# Altium footprint library WR-TBL_Pluggable Connector_5.08mm.PcbLib: 295 footprints (part 6 of 19)
Each footprint in its own frame and in the unit in brackets; x right, y up, seen from the top. Pads: shape width x height; smd on the part's side, far side on the other; paste and mask are expansions set on the pad; w line width, h text height; cw(c..) or ccw(c..) is an arc to the next point about the centre after c.
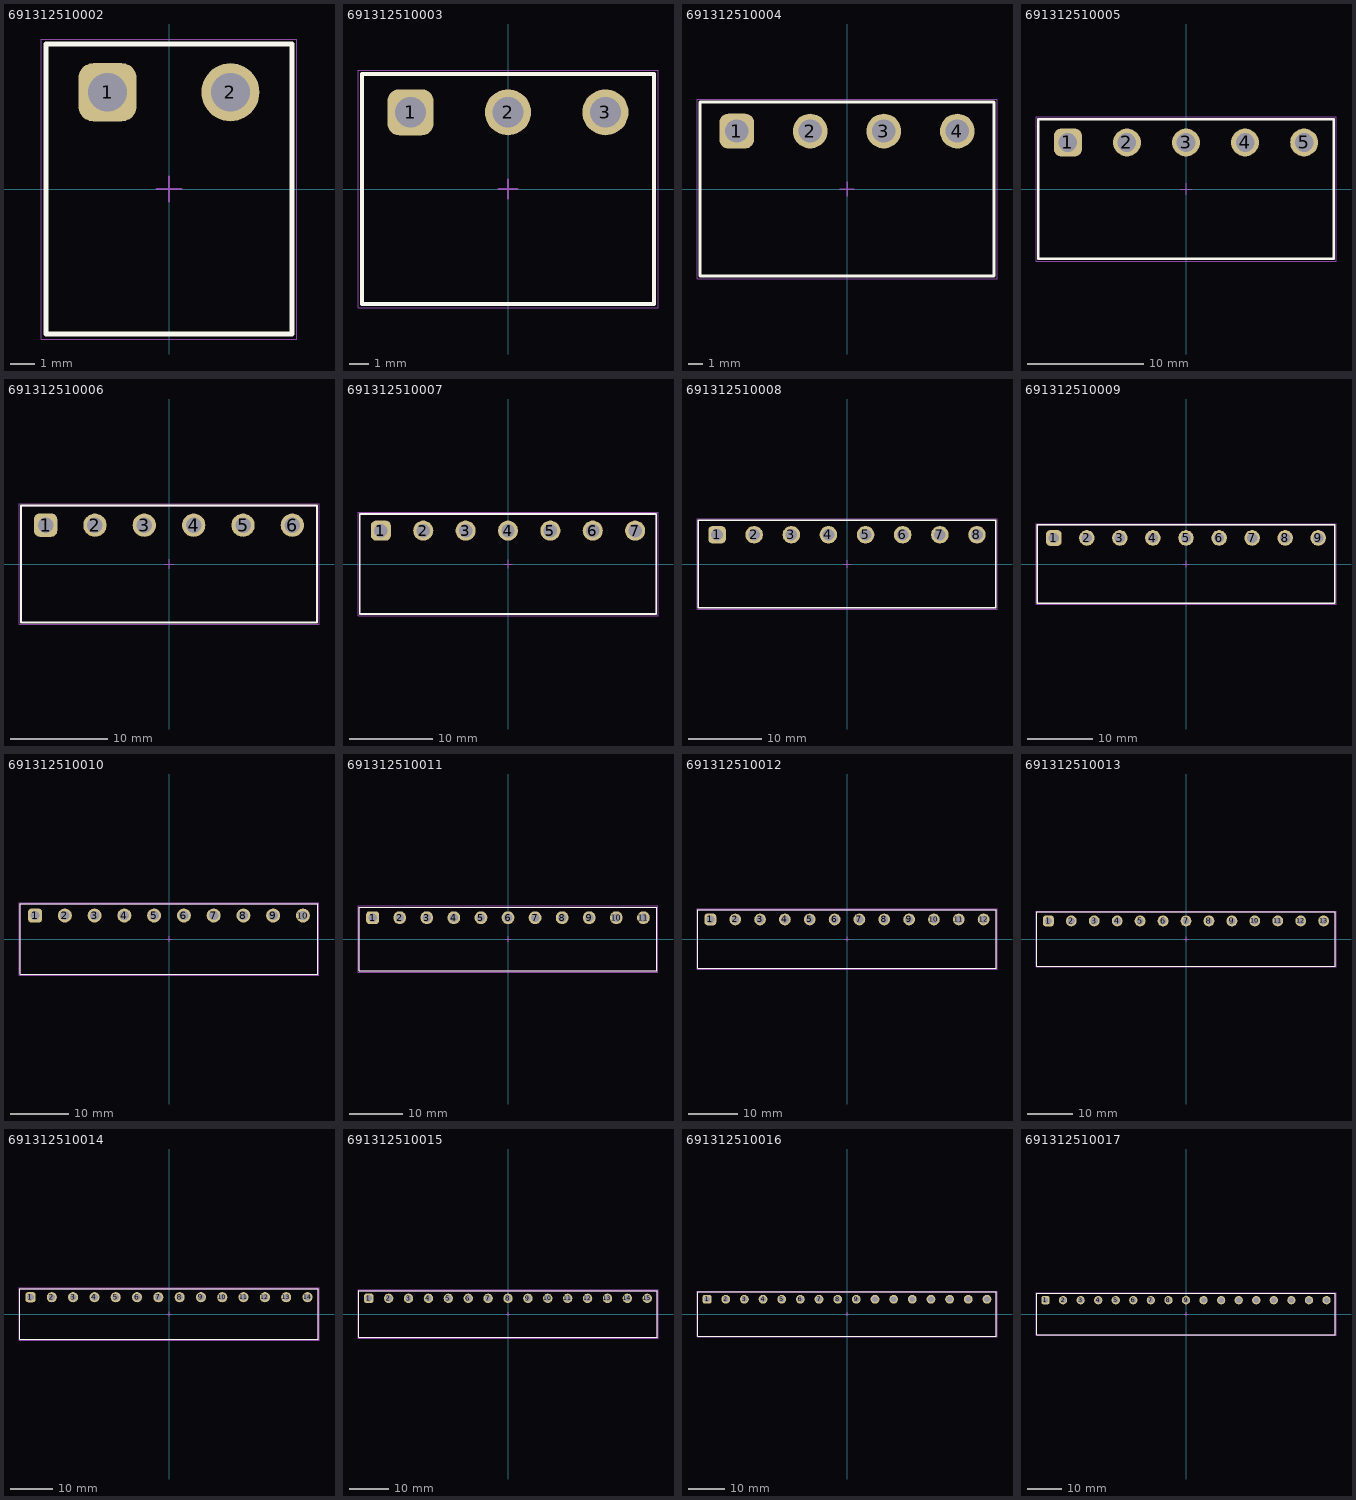
[diagram p5: the footprints below, top view; thin cyan lines are the x and y axes]

## 691312510002 [mm] "5,08mm - PCB Headers - Horizontal - Opened ends - 02p"
height 8.5
pads (2):
  rrect50% 2.4x2.4 hole 1.6: 1(-2.54,4)
  round 2.4 hole 1.6: 2(2.54,4)
Top Overlay:
  lines w0.2: -5.08,-6 5.08,-6 5.08,6 -5.08,6 -5.08,-6
Top Assembly:
  lines w0.1: -5.08,-6 -5.08,6 5.08,6 5.08,-6 -5.08,-6
Top Designator:
  text ".Designator" at -3.647,-0.357 h1
Top 3D Body:
  lines w0.1: -5.08,-6 5.08,-6 5.08,6 -5.08,6 -5.08,-6
Top Courtyard:
  lines w0.05: -5.28,-6.2 5.28,-6.2 5.28,6.2 -5.28,6.2 -5.28,-6.2
Top Component Center:
  lines w0.1: -0.5,0 0.5,0 ; 0,-0.5 0,0.5
3D body "691312510002.stp": height 8.55, standoff -3.45, extent -5.08,-6 5.08,6

## 691312510003 [mm] "5,08mm - PCB Headers - Horizontal - Opened ends - 03p"
height 8.5
pads (3):
  rrect50% 2.4x2.4 hole 1.6: 1(-5.08,4)
  round 2.4 hole 1.6: 2(0,4) 3(5.08,4)
Top Overlay:
  lines w0.2: -7.62,-6 -7.62,6 7.62,6 7.62,-6 -7.62,-6
Top Assembly:
  lines w0.1: -7.62,-6 7.62,-6 7.62,6 -7.62,6 -7.62,-6
Top Designator:
  text ".Designator" at -3.647,-0.357 h1
Top 3D Body:
  lines w0.1: -7.62,-6 -7.62,6 7.62,6 7.62,-6 -7.62,-6
Top Courtyard:
  lines w0.05: -7.82,-6.2 -7.82,6.2 7.82,6.2 7.82,-6.2 -7.82,-6.2
Top Component Center:
  lines w0.1: -0.5,0 0.5,0 ; 0,-0.5 0,0.5
3D body "691312510003.stp": height 8.55, standoff -3.45, extent -7.62,-6 7.62,6

## 691312510004 [mm] "5,08mm - PCB Headers - Horizontal - Opened ends - 04p"
height 8.5
pads (4):
  rrect50% 2.4x2.4 hole 1.6: 1(-7.62,4)
  round 2.4 hole 1.6: 2(-2.54,4) 3(2.54,4) 4(7.62,4)
Top Overlay:
  lines w0.2: -10.16,-6 -10.16,6 10.16,6 10.16,-6 -10.16,-6
Top Assembly:
  lines w0.1: -10.16,-6 10.16,-6 10.16,6 -10.16,6 -10.16,-6
Top Designator:
  text ".Designator" at -3.647,-0.357 h1
Top 3D Body:
  lines w0.1: -10.16,-6 -10.16,6 10.16,6 10.16,-6 -10.16,-6
Top Courtyard:
  lines w0.05: -10.36,-6.2 -10.36,6.2 10.36,6.2 10.36,-6.2 -10.36,-6.2
Top Component Center:
  lines w0.1: -0.5,0 0.5,0 ; 0,-0.5 0,0.5
3D body "691312510004.stp": height 8.55, standoff -3.45, extent -10.16,-6 10.16,6

## 691312510005 [mm] "5,08mm - PCB Headers - Horizontal - Opened ends - 05p"
height 8.5
pads (5):
  rrect50% 2.4x2.4 hole 1.6: 1(-10.16,4)
  round 2.4 hole 1.6: 2(-5.08,4) 3(0,4) 4(5.08,4) 5(10.16,4)
Top Overlay:
  lines w0.2: -12.7,-6 -12.7,6 12.7,6 12.7,-6 -12.7,-6
Top Assembly:
  lines w0.1: -12.7,-6 12.7,-6 12.7,6 -12.7,6 -12.7,-6
Top Designator:
  text ".Designator" at -3.647,-0.357 h1
Top 3D Body:
  lines w0.1: -12.7,-6 -12.7,6 12.7,6 12.7,-6 -12.7,-6
Top Courtyard:
  lines w0.05: -12.9,-6.2 -12.9,6.2 12.9,6.2 12.9,-6.2 -12.9,-6.2
Top Component Center:
  lines w0.1: -0.5,0 0.5,0 ; 0,-0.5 0,0.5
3D body "691312510005.stp": height 8.55, standoff -3.45, extent -12.7,-6 12.7,6

## 691312510006 [mm] "5,08mm - PCB Headers - Horizontal - Opened ends - 06p"
height 8.5
pads (6):
  rrect50% 2.4x2.4 hole 1.6: 1(-12.7,4)
  round 2.4 hole 1.6: 2(-7.62,4) 3(-2.54,4) 4(2.54,4) 5(7.62,4) 6(12.7,4)
Top Overlay:
  lines w0.2: -15.24,-6 15.24,-6 15.24,6 -15.24,6 -15.24,-6
Top Assembly:
  lines w0.1: -15.24,-6 -15.24,6 15.24,6 15.24,-6 -15.24,-6
Top Designator:
  text ".Designator" at -3.647,-0.357 h1
Top 3D Body:
  lines w0.1: -15.24,-6 15.24,-6 15.24,6 -15.24,6 -15.24,-6
Top Courtyard:
  lines w0.05: -15.44,-6.2 15.44,-6.2 15.44,6.2 -15.44,6.2 -15.44,-6.2
Top Component Center:
  lines w0.1: -0.5,0 0.5,0 ; 0,-0.5 0,0.5
3D body "691312510006.stp": height 8.55, standoff -3.45, extent -15.24,-6 15.24,6

## 691312510007 [mm] "5,08mm - PCB Headers - Horizontal - Opened ends - 07p"
height 8.5
pads (7):
  rrect50% 2.4x2.4 hole 1.6: 1(-15.24,4)
  round 2.4 hole 1.6: 2(-10.16,4) 3(-5.08,4) 4(0,4) 5(5.08,4) 6(10.16,4) 7(15.24,4)
Top Overlay:
  lines w0.2: -17.78,-6 17.78,-6 17.78,6 -17.78,6 -17.78,-6
Top Assembly:
  lines w0.1: -17.78,-6 -17.78,6 17.78,6 17.78,-6 -17.78,-6
Top Designator:
  text ".Designator" at -3.647,-0.357 h1
Top 3D Body:
  lines w0.1: -17.78,-6 17.78,-6 17.78,6 -17.78,6 -17.78,-6
Top Courtyard:
  lines w0.05: -17.98,-6.2 17.98,-6.2 17.98,6.2 -17.98,6.2 -17.98,-6.2
Top Component Center:
  lines w0.1: -0.5,0 0.5,0 ; 0,-0.5 0,0.5
3D body "691312510007.stp": height 8.55, standoff -3.45, extent -17.78,-6 17.78,6

## 691312510008 [mm] "5,08mm - PCB Headers - Horizontal - Opened ends - 08p"
height 8.5
pads (8):
  rrect50% 2.4x2.4 hole 1.6: 1(-17.78,4)
  round 2.4 hole 1.6: 2(-12.7,4) 3(-7.62,4) 4(-2.54,4) 5(2.54,4) 6(7.62,4) 7(12.7,4) 8(17.78,4)
Top Overlay:
  lines w0.2: -20.32,-6 -20.32,6 20.32,6 20.32,-6 -20.32,-6
Top Assembly:
  lines w0.1: -20.32,-6 20.32,-6 20.32,6 -20.32,6 -20.32,-6
Top Designator:
  text ".Designator" at -3.647,-0.357 h1
Top 3D Body:
  lines w0.1: -20.32,-6 -20.32,6 20.32,6 20.32,-6 -20.32,-6
Top Courtyard:
  lines w0.05: -20.52,-6.2 -20.52,6.2 20.52,6.2 20.52,-6.2 -20.52,-6.2
Top Component Center:
  lines w0.1: -0.5,0 0.5,0 ; 0,-0.5 0,0.5
3D body "691312510008.stp": height 8.55, standoff -3.45, extent -20.32,-6 20.32,6

## 691312510009 [mm] "5,08mm - PCB Headers - Horizontal - Opened ends - 09p"
height 8.5
pads (9):
  rrect50% 2.4x2.4 hole 1.6: 1(-20.32,4)
  round 2.4 hole 1.6: 2(-15.24,4) 3(-10.16,4) 4(-5.08,4) 5(0,4) 6(5.08,4) 7(10.16,4) 8(15.24,4) 9(20.32,4)
Top Overlay:
  lines w0.2: -22.86,-6 22.86,-6 22.86,6 -22.86,6 -22.86,-6
Top Assembly:
  lines w0.1: -22.86,-6 -22.86,6 22.86,6 22.86,-6 -22.86,-6
Top Designator:
  text ".Designator" at -3.647,-0.357 h1
Top 3D Body:
  lines w0.1: -22.86,-6 22.86,-6 22.86,6 -22.86,6 -22.86,-6
Top Courtyard:
  lines w0.05: -23.06,-6.2 23.06,-6.2 23.06,6.2 -23.06,6.2 -23.06,-6.2
Top Component Center:
  lines w0.1: -0.5,0 0.5,0 ; 0,-0.5 0,0.5
3D body "691312510009.stp": height 8.55, standoff -3.45, extent -22.86,-6 22.86,6

## 691312510010 [mm] "5,08mm - PCB Headers - Horizontal - Opened ends - 10p"
height 8.5
pads (10):
  rrect50% 2.4x2.4 hole 1.6: 1(-22.86,4)
  round 2.4 hole 1.6: 2(-17.78,4) 3(-12.7,4) 4(-7.62,4) 5(-2.54,4) 6(2.54,4) 7(7.62,4) 8(12.7,4) 9(17.78,4) 10(22.86,4)
Top Overlay:
  lines w0.2: -25.4,-6 -25.4,6 25.4,6 25.4,-6 -25.4,-6
Top Assembly:
  lines w0.1: -25.4,-6 25.4,-6 25.4,6 -25.4,6 -25.4,-6
Top Designator:
  text ".Designator" at -3.647,-0.357 h1
Top 3D Body:
  lines w0.1: -25.4,-6 -25.4,6 25.4,6 25.4,-6 -25.4,-6
Top Courtyard:
  lines w0.05: -25.6,-6.2 -25.6,6.2 25.6,6.2 25.6,-6.2 -25.6,-6.2
Top Component Center:
  lines w0.1: -0.5,0 0.5,0 ; 0,-0.5 0,0.5
3D body "691312510010.stp": height 8.55, standoff -3.45, extent -25.4,-6 25.4,6

## 691312510011 [mm] "5,08mm - PCB Headers - Horizontal - Opened ends - 11p"
height 8.5
pads (11):
  rrect50% 2.4x2.4 hole 1.6: 1(-25.4,4)
  round 2.4 hole 1.6: 2(-20.32,4) 3(-15.24,4) 4(-10.16,4) 5(-5.08,4) 6(0,4) 7(5.08,4) 8(10.16,4) 9(15.24,4) 10(20.32,4) 11(25.4,4)
Top Overlay:
  lines w0.2: -27.94,-6 27.94,-6 27.94,6 -27.94,6 -27.94,-6
Top Assembly:
  lines w0.1: -27.94,-6 -27.94,6 27.94,6 27.94,-6 -27.94,-6
Top Designator:
  text ".Designator" at -3.647,-0.357 h1
Top 3D Body:
  lines w0.1: -27.94,-6 27.94,-6 27.94,6 -27.94,6 -27.94,-6
Top Courtyard:
  lines w0.05: -28.14,-6.2 28.14,-6.2 28.14,6.2 -28.14,6.2 -28.14,-6.2
Top Component Center:
  lines w0.1: -0.5,0 0.5,0 ; 0,-0.5 0,0.5
3D body "691312510011.stp": height 8.55, standoff -3.45, extent -27.94,-6 27.94,6

## 691312510012 [mm] "5,08mm - PCB Headers - Horizontal - Opened ends - 12p"
height 8.5
pads (12):
  rrect50% 2.4x2.4 hole 1.6: 1(-27.94,4)
  round 2.4 hole 1.6: 2(-22.86,4) 3(-17.78,4) 4(-12.7,4) 5(-7.62,4) 6(-2.54,4) 7(2.54,4) 8(7.62,4) 9(12.7,4) 10(17.78,4) 11(22.86,4) 12(27.94,4)
Top Overlay:
  lines w0.2: -30.48,-6 30.48,-6 30.48,6 -30.48,6 -30.48,-6
Top Assembly:
  lines w0.1: -30.48,-6 -30.48,6 30.48,6 30.48,-6 -30.48,-6
Top Designator:
  text ".Designator" at -3.647,-0.357 h1
Top 3D Body:
  lines w0.1: -30.48,-6 30.48,-6 30.48,6 -30.48,6 -30.48,-6
Top Courtyard:
  lines w0.05: -30.68,-6.2 30.68,-6.2 30.68,6.2 -30.68,6.2 -30.68,-6.2
Top Component Center:
  lines w0.1: -0.5,0 0.5,0 ; 0,-0.5 0,0.5
3D body "691312510012.stp": height 8.55, standoff -3.45, extent -30.48,-6 30.48,6

## 691312510013 [mm] "5,08mm - PCB Headers - Horizontal - Opened ends - 13p"
height 8.5
pads (13):
  rrect50% 2.4x2.4 hole 1.6: 1(-30.48,4)
  round 2.4 hole 1.6: 2(-25.4,4) 3(-20.32,4) 4(-15.24,4) 5(-10.16,4) 6(-5.08,4) 7(0,4) 8(5.08,4) 9(10.16,4) 10(15.24,4) 11(20.32,4) 12(25.4,4) 13(30.48,4)
Top Overlay:
  lines w0.2: -33.02,-6 -33.02,6 33.02,6 33.02,-6 -33.02,-6
Top Assembly:
  lines w0.1: -33.02,-6 33.02,-6 33.02,6 -33.02,6 -33.02,-6
Top Designator:
  text ".Designator" at -3.647,-0.357 h1
Top 3D Body:
  lines w0.1: -33.02,-6 -33.02,6 33.02,6 33.02,-6 -33.02,-6
Top Courtyard:
  lines w0.05: -33.22,-6.2 -33.22,6.2 33.22,6.2 33.22,-6.2 -33.22,-6.2
Top Component Center:
  lines w0.1: -0.5,0 0.5,0 ; 0,-0.5 0,0.5
3D body "691312510013.stp": height 8.55, standoff -3.45, extent -33.02,-6 33.02,6

## 691312510014 [mm] "5,08mm - PCB Headers - Horizontal - Opened ends - 14p"
height 8.5
pads (14):
  rrect50% 2.4x2.4 hole 1.6: 1(-33.02,4)
  round 2.4 hole 1.6: 2(-27.94,4) 3(-22.86,4) 4(-17.78,4) 5(-12.7,4) 6(-7.62,4) 7(-2.54,4) 8(2.54,4) 9(7.62,4) 10(12.7,4) 11(17.78,4) 12(22.86,4) 13(27.94,4) 14(33.02,4)
Top Overlay:
  lines w0.2: -35.56,-6 35.56,-6 35.56,6 -35.56,6 -35.56,-6
Top Assembly:
  lines w0.1: -35.56,-6 -35.56,6 35.56,6 35.56,-6 -35.56,-6
Top Designator:
  text ".Designator" at -3.647,-0.357 h1
Top 3D Body:
  lines w0.1: -35.56,-6 35.56,-6 35.56,6 -35.56,6 -35.56,-6
Top Courtyard:
  lines w0.05: -35.76,-6.2 35.76,-6.2 35.76,6.2 -35.76,6.2 -35.76,-6.2
Top Component Center:
  lines w0.1: -0.5,0 0.5,0 ; 0,-0.5 0,0.5
3D body "691312510014.stp": height 8.55, standoff -3.45, extent -35.56,-6 35.56,6

## 691312510015 [mm] "5,08mm - PCB Headers - Horizontal - Opened ends - 15p"
height 8.5
pads (15):
  rrect50% 2.4x2.4 hole 1.6: 1(-35.56,4)
  round 2.4 hole 1.6: 2(-30.48,4) 3(-25.4,4) 4(-20.32,4) 5(-15.24,4) 6(-10.16,4) 7(-5.08,4) 8(0,4) 9(5.08,4) 10(10.16,4) 11(15.24,4) 12(20.32,4) 13(25.4,4) 14(30.48,4) 15(35.56,4)
Top Overlay:
  lines w0.2: -38.1,-6 -38.1,6 38.1,6 38.1,-6 -38.1,-6
Top Assembly:
  lines w0.1: -38.1,-6 38.1,-6 38.1,6 -38.1,6 -38.1,-6
Top Designator:
  text ".Designator" at -3.647,-0.357 h1
Top 3D Body:
  lines w0.1: -38.1,-6 -38.1,6 38.1,6 38.1,-6 -38.1,-6
Top Courtyard:
  lines w0.05: -38.3,-6.2 -38.3,6.2 38.3,6.2 38.3,-6.2 -38.3,-6.2
Top Component Center:
  lines w0.1: -0.5,0 0.5,0 ; 0,-0.5 0,0.5
3D body "691312510015.stp": height 8.55, standoff -3.45, extent -38.1,-6 38.1,6

## 691312510016 [mm] "5,08mm - PCB Headers - Horizontal - Opened ends - 16p"
height 8.5
pads (16):
  rrect50% 2.4x2.4 hole 1.6: 1(-38.1,4)
  round 2.4 hole 1.6: 2(-33.02,4) 3(-27.94,4) 4(-22.86,4) 5(-17.78,4) 6(-12.7,4) 7(-7.62,4) 8(-2.54,4) 9(2.54,4) 10(7.62,4) 11(12.7,4) 12(17.78,4) 13(22.86,4) 14(27.94,4) 15(33.02,4) 16(38.1,4)
Top Overlay:
  lines w0.2: -40.64,-6 -40.64,6 40.64,6 40.64,-6 -40.64,-6
Top Assembly:
  lines w0.1: -40.64,-6 40.64,-6 40.64,6 -40.64,6 -40.64,-6
Top Designator:
  text ".Designator" at -3.647,-0.357 h1
Top 3D Body:
  lines w0.1: -40.64,-6 -40.64,6 40.64,6 40.64,-6 -40.64,-6
Top Courtyard:
  lines w0.05: -40.84,-6.2 -40.84,6.2 40.84,6.2 40.84,-6.2 -40.84,-6.2
Top Component Center:
  lines w0.1: -0.5,0 0.5,0 ; 0,-0.5 0,0.5
3D body "691312510016.stp": height 8.55, standoff -3.45, extent -40.64,-6 40.64,6

## 691312510017 [mm] "5,08mm - PCB Headers - Horizontal - Opened ends - 17p"
height 8.5
pads (17):
  rrect50% 2.4x2.4 hole 1.6: 1(-40.64,4)
  round 2.4 hole 1.6: 2(-35.56,4) 3(-30.48,4) 4(-25.4,4) 5(-20.32,4) 6(-15.24,4) 7(-10.16,4) 8(-5.08,4) 9(0,4) 10(5.08,4) 11(10.16,4) 12(15.24,4) 13(20.32,4) 14(25.4,4) 15(30.48,4) 16(35.56,4) 17(40.64,4)
Top Overlay:
  lines w0.2: -43.18,-6 43.18,-6 43.18,6 -43.18,6 -43.18,-6
Top Assembly:
  lines w0.1: -43.18,-6 -43.18,6 43.18,6 43.18,-6 -43.18,-6
Top Designator:
  text ".Designator" at -3.647,-0.357 h1
Top 3D Body:
  lines w0.1: -43.18,-6 43.18,-6 43.18,6 -43.18,6 -43.18,-6
Top Courtyard:
  lines w0.05: -43.38,-6.2 43.38,-6.2 43.38,6.2 -43.38,6.2 -43.38,-6.2
Top Component Center:
  lines w0.1: -0.5,0 0.5,0 ; 0,-0.5 0,0.5
3D body "691312510017.stp": height 8.55, standoff -3.45, extent -43.18,-6 43.18,6